# Altium footprint library 三接口压线端子.PcbLib: 1 footprints
Each footprint in its own frame and in the unit in brackets; x right, y up, seen from the top. Pads: shape width x height; smd on the part's side, far side on the other; paste and mask are expansions set on the pad; w line width, h text height; cw(c..) or ccw(c..) is an arc to the next point about the centre after c.
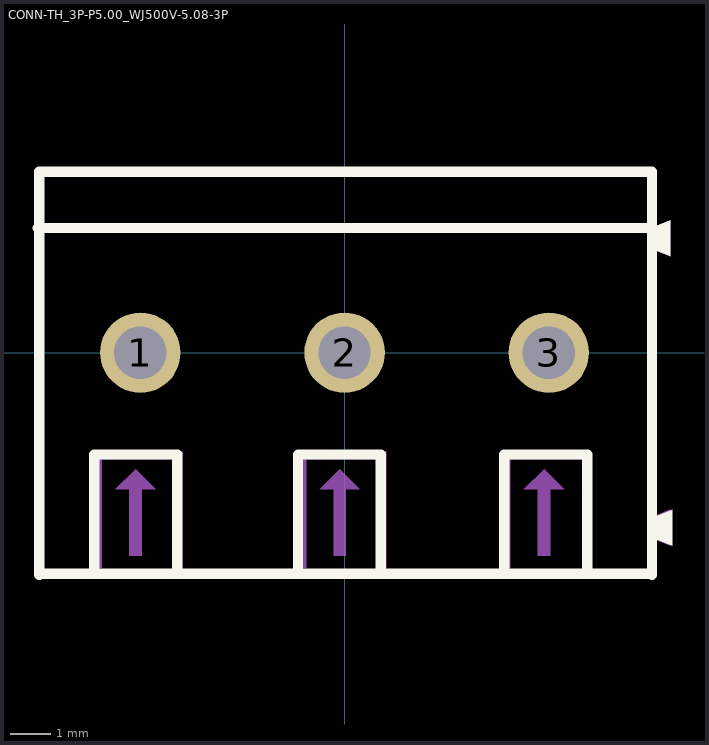
[diagram p0: the footprint, top view; thin cyan lines are the x and y axes]

## CONN-TH_3P-P5.00_WJ500V-5.08-3P [mm]
pads (3):
  round 2 hole 1.3: 1(-5.08,0) 2(0,0) 3(5.08,0)
Top Overlay:
  region: 7.648,-4.107 8.148,-3.907 8.148,-4.807 7.648,-4.607
  region: 7.6,3.1 8.1,3.3 8.1,2.4 7.6,2.6
  lines w0.254: -7.64,3.1 7.6,3.1 ; -7.594,-5.532 -7.594,4.468 ; -7.594,-5.5 7.646,-5.5 ; -7.594,4.5 7.646,4.5 ; -6.224,-5.5 -6.224,-2.53 -4.162,-2.53 -4.162,-5.5 ; -1.162,-5.5 -1.162,-2.53 0.9,-2.53 0.9,-5.5 ; 3.972,-5.5 3.972,-2.53 6.034,-2.53 6.034,-5.5 ; 7.646,-5.522 7.646,4.478
Mechanical 2:
  region: 4.96,-2.9 4.46,-3.4 5.46,-3.4
  region: 4.81,-3.35 4.81,-5.05 5.11,-5.05 5.11,-3.35
  region: -0.12,-2.9 -0.62,-3.4 0.38,-3.4
  region: -0.27,-3.35 -0.27,-5.05 0.03,-5.05 0.03,-3.35
  region: -5.35,-3.35 -5.35,-5.05 -5.05,-5.05 -5.05,-3.35
  region: -5.2,-2.9 -5.7,-3.4 -4.7,-3.4
  region: 7.6,-4.1 8.1,-3.9 8.1,-4.8 7.6,-4.6
  region: 7.6,3.1 8.1,3.3 8.1,2.4 7.6,2.6
  region: -6.24,-5.355 -6.24,-2.455 -6.04,-2.455 -6.04,-5.355
  region: -4.04,-5.355 -4.04,-2.455 -4.24,-2.455 -4.24,-5.355
  region: -4.24,-2.455 -6.04,-2.455 -6.04,-2.655 -4.24,-2.655
  region: -1.16,-5.355 -1.16,-2.455 -0.96,-2.455 -0.96,-5.355
  region: 1.04,-5.355 1.04,-2.455 0.84,-2.455 0.84,-5.355
  region: 0.84,-2.455 -0.96,-2.455 -0.96,-2.655 0.84,-2.655
  region: 5.92,-2.455 4.12,-2.455 4.12,-2.655 5.92,-2.655
  region: 3.92,-5.355 3.92,-2.455 4.12,-2.455 4.12,-5.355
  region: 6.12,-5.355 6.12,-2.455 5.92,-2.455 5.92,-5.355
Mechanical 6:
  lines w0.051: -7.62,-5.5 7.62,-5.5 7.62,4.5 -7.62,4.5 -7.62,-5.5
Mechanical 8:
  region: -7.56,-5.5 -7.56,-5.525 -7.595,-5.56 -7.645,-5.56 -7.68,-5.525 -7.68,-5.5 -7.68,-5.475 -7.645,-5.44 -7.595,-5.44 -7.56,-5.475 -7.56,-5.5
Mechanical 9:
  region: 5.53,-0.4 4.63,-0.4 4.63,0.4 5.53,0.4
  region: 0.45,-0.4 -0.45,-0.4 -0.45,0.4 0.45,0.4
  region: -4.63,-0.4 -5.53,-0.4 -5.53,0.4 -4.63,0.4